# Altium schematic symbol library 397730002.SchLib: 1 symbol
Pins are listed as number, name and electrical type; pins without a type are passive.

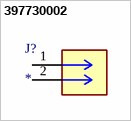
[diagram p0: symbol 397730002]

## 397730002
designator J?
2 Position Wire to Board Terminal Block Horizontal with Board 0.100 (2.54mm) Through Hole; MF: Molex; MP: 397730002; SnapEDA_Link: https://www.snapeda.com/parts/397730002/Molex/view-part/?ref=snap; Package: None; Value: *; Check_prices: https://www.snapeda.com/parts/397730002/Molex/view-part/?ref=eda
footprint CONN_39773-0002_MOL
pins: 1, 2